# Altium footprint library IR Sensor.PCBLIB: 9 footprints
Each footprint in its own frame and in the unit in brackets; x right, y up, seen from the top. Pads: shape width x height; smd on the part's side, far side on the other; paste and mask are expansions set on the pad; w line width, h text height; cw(c..) or ccw(c..) is an arc to the next point about the centre after c.
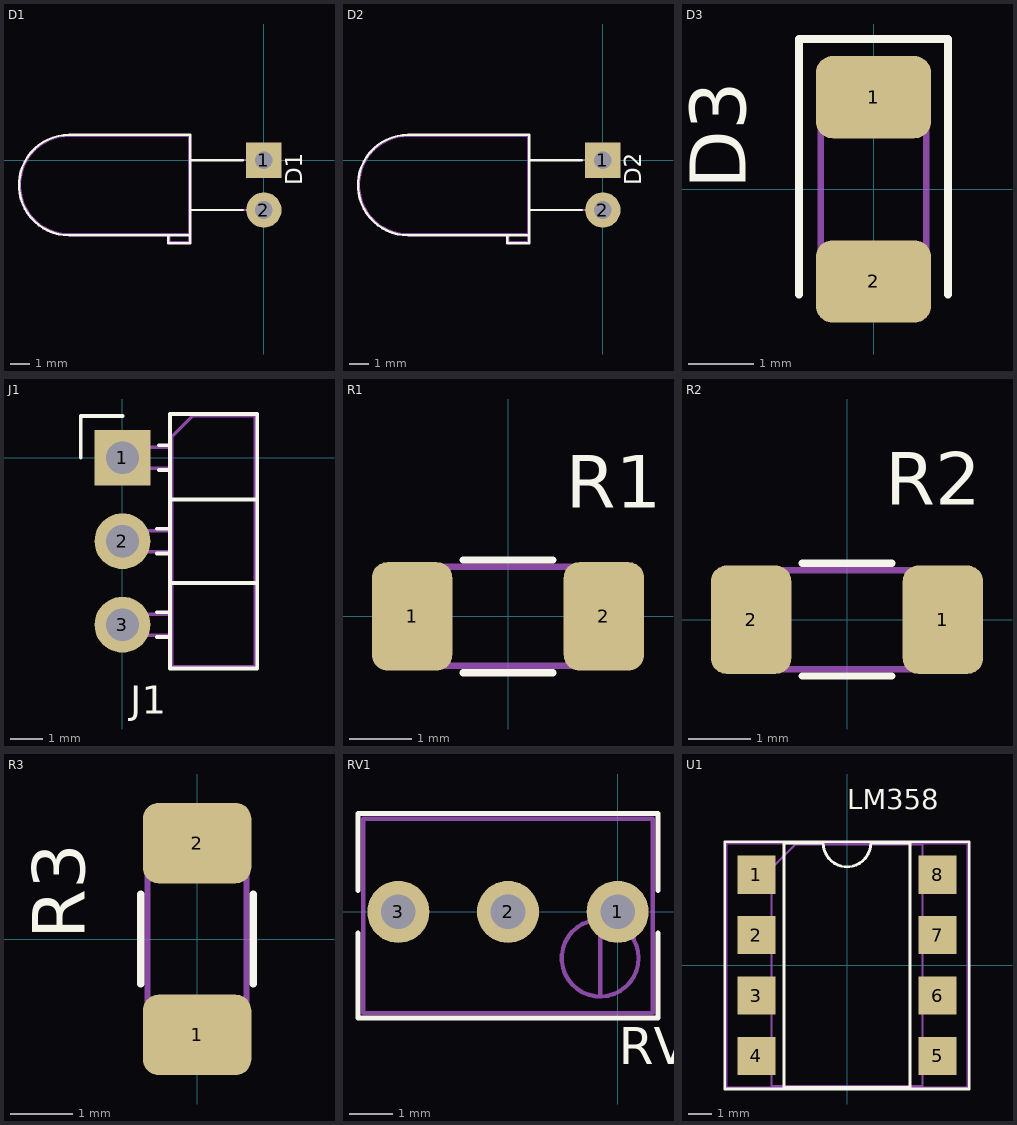
[diagram p0: the footprints below, top view; thin cyan lines are the x and y axes]

## D1 [mil]
pads (2):
  rect 70.87x70.87 / inner round 65.48 / far side rect 70.87x70.87 hole 35.43: 1(0,0)
  round 70.87 hole 35.43: 2(0,-100)
Top Overlay:
  lines w4.72: -147.64,-150.79 -191.73,-150.79 -191.73,-166.54 -147.64,-166.54 -147.64,-150.79 ; -147.64,-150.79 -147.64,50.79 -390.16,50.79 ccw(c-390.16,-50) -390.16,-150.79 -147.64,-150.79 ; -147.64,-100 -147.64,-100 ; -147.64,-100 -42.52,-100 ; -147.64,-100 -42.52,-100 ; -147.64,0 -147.64,0 ; -147.64,0 -42.52,0 ; -147.64,0 -42.52,0 ; -42.52,-100 -42.52,-100 ; -42.52,0 -42.52,0
  text "D1" at 77.17,-50 h33.46
tDocu:
  lines w3.94: -150,-148.43 -189.37,-148.43 -189.37,-164.17 -150,-164.17 -150,-148.43 ; -150,-148.43 -150,48.43 -390.16,48.43 ccw(c-390.16,-50) -390.16,-148.43 -150,-148.43 ; -150,-100 -150,-100 ; -150,-100 0,-100 ; -150,-100 0,-100 ; -150,0 -150,0 ; -150,0 0,0 ; -150,0 0,0 ; 0,-100 0,-100 ; 0,0 0,0
3D body "LED_D5.0mm_Horizontal_O3.81mm_Z3.0mm.step": height 232.28, standoff -78.74, extent -488.58,-164.17 11.81,48.43

## D2 [mil]
pads (2):
  rect 70.87x70.87 / inner round 65.48 / far side rect 70.87x70.87 hole 35.43: 1(0,0)
  round 70.87 hole 35.43: 2(0,-100)
Top Overlay:
  lines w4.72: -147.64,-150.79 -191.73,-150.79 -191.73,-166.54 -147.64,-166.54 -147.64,-150.79 ; -147.64,-150.79 -147.64,50.79 -390.16,50.79 ccw(c-390.16,-50) -390.16,-150.79 -147.64,-150.79 ; -147.64,-100 -147.64,-100 ; -147.64,-100 -42.52,-100 ; -147.64,-100 -42.52,-100 ; -147.64,0 -147.64,0 ; -147.64,0 -42.52,0 ; -147.64,0 -42.52,0 ; -42.52,-100 -42.52,-100 ; -42.52,0 -42.52,0
  text "D2" at 77.17,-50 h33.46
tDocu:
  lines w3.94: -150,-148.43 -189.37,-148.43 -189.37,-164.17 -150,-164.17 -150,-148.43 ; -150,-148.43 -150,48.43 -390.16,48.43 ccw(c-390.16,-50) -390.16,-148.43 -150,-148.43 ; -150,-100 -150,-100 ; -150,-100 0,-100 ; -150,-100 0,-100 ; -150,0 -150,0 ; -150,0 0,0 ; -150,0 0,0 ; 0,-100 0,-100 ; 0,0 0,0
3D body "LED_D5.0mm_Horizontal_O3.81mm_Z3.0mm.step": height 232.28, standoff -78.74, extent -488.58,-164.17 11.81,48.43

## D3 [mil]
pads (2):
  rrect40% 68.9x49.21 smd: 1(0,55.12) 2(0,-55.12)
Top Overlay:
  lines w4.72: -44.69,-62.99 -44.69,89.96 44.69,89.96 44.69,-62.99
  text "D3" at -76.42,0 h33.46
tDocu:
  lines w3.94: -31.5,-62.99 -31.5,62.99 15.75,62.99 31.5,47.24 31.5,-62.99 -31.5,-62.99
3D body "LED_1206_3216Metric.step": height 43.31, standoff 0, extent -31.5,-62.99 31.5,62.99

## J1 [mm]
pads (3):
  rect 1.7x1.7 / inner round 1.571 / far side rect 1.7x1.7 hole 1: 1(0,0)
  round 1.7 hole 1: 2(0,-2.54) 3(0,-5.08)
Top Overlay:
  lines w0.12: -1.27,0 -1.27,1.27 0,1.27 ; 1.043,-5.46 1.44,-5.46 ; 1.043,-4.7 1.44,-4.7 ; 1.043,-2.92 1.44,-2.92 ; 1.043,-2.16 1.44,-2.16 ; 1.11,-0.38 1.44,-0.38 ; 1.11,0.38 1.44,0.38 ; 1.44,-3.81 4.1,-3.81 ; 1.44,-1.27 4.1,-1.27 ; 1.44,-6.41 1.44,1.33 4.1,1.33 4.1,-6.41 1.44,-6.41
  text "J1" at 0.24,-7.796 h0.85
tDocu:
  lines w0.1: 1.5,-5.4 -0.32,-5.4 -0.32,-4.76 1.5,-4.76 ; 1.5,-2.86 -0.32,-2.86 -0.32,-2.22 1.5,-2.22 ; 1.5,-0.32 -0.32,-0.32 -0.32,0.32 1.5,0.32 ; 1.5,-6.35 1.5,0.635 2.135,1.27 4.04,1.27 4.04,-6.35 1.5,-6.35
3D body "PinHeader_1x03_P2.54mm_Horizontal.step": height 2.54, standoff -3, extent -0.32,-6.35 10.04,1.27

## R1 [mil]
pads (2):
  rrect38% 51.18x68.9 smd: 1(-61.02,0) 2(61.02,0)
Top Overlay:
  lines w4.72: -28.62,-35.83 28.62,-35.83 ; -28.62,35.83 28.62,35.83
  text "R1" at 36.83,68.92 h33.46
tDocu:
  lines w3.94: -62.99,-31.5 -62.99,31.5 62.99,31.5 62.99,-31.5 -62.99,-31.5
3D body "R_1206_3216Metric.step": height 21.65, standoff 0, extent -62.99,-31.5 62.99,31.5

## R2 [mil]
pads (2):
  rrect38% 51.18x68.9 smd: 1(61.02,0) 2(-61.02,0)
Top Overlay:
  lines w4.72: -28.62,-35.83 28.62,-35.83 ; -28.62,35.83 28.62,35.83
  text "R2" at 24.36,73.32 h33.46
tDocu:
  lines w3.94: -62.99,-31.5 -62.99,31.5 62.99,31.5 62.99,-31.5 -62.99,-31.5
3D body "R_1206_3216Metric.step": height 21.65, standoff 0, extent -62.99,-31.5 62.99,31.5

## R3 [mil]
pads (2):
  rrect38% 68.9x51.18 smd: 1(0,-61.02) 2(0,61.02)
Top Overlay:
  lines w4.72: -35.83,-28.62 -35.83,28.62 ; 35.83,-28.62 35.83,28.62
  text "R3" at -71.65,0 h33.46
tDocu:
  lines w3.94: -31.5,-62.99 -31.5,62.99 31.5,62.99 31.5,-62.99 -31.5,-62.99
3D body "R_1206_3216Metric.step": height 21.65, standoff 0, extent -31.5,-62.99 31.5,62.99

## RV1 [mil]
pads (3):
  round 56.69 hole 31.5: 1(0,0) 2(-100,0) 3(-200,0)
Top Overlay:
  lines w4.72: -236.81,-19.53 -236.81,-96.85 36.81,-96.85 36.81,-19.53 ; -236.81,19.45 -236.81,89.76 36.81,89.76 36.81,19.45
  text "RV1" at 0.91,-139.15 h33.46
tDocu:
  circle w3.94: c-15.94,-42.13 r35.04
  lines w3.94: -232.09,-92.13 -232.09,85.04 32.09,85.04 32.09,-92.13 -232.09,-92.13 ; -15.94,-76.85 -15.91,-7.44 -15.94,-76.85
3D body "Potentiometer_Bourns_3266Y_Vertical.step": height 325.2, standoff -192.13, extent -232.09,-88.58 32.09,88.58

## U1 [mil]
pads (8):
  rect 62.99x62.99 smd: 1(-150,150) 2(-150,50) 3(-150,-50) 4(-150,-150) 5(150,-150) 6(150,-50) 7(150,50) 8(150,150)
Top Overlay:
  lines w4.72: -202.36,-204.72 -202.36,204.72 202.36,204.72 202.36,-204.72 -202.36,-204.72 ; -104.33,-202.36 -104.33,202.36 -39.37,202.36 ccw(c0,202.36) 39.37,202.36 104.33,202.36 104.33,-202.36 -104.33,-202.36
  text "LM358" at 0,258.48 h33.46
tDocu:
  lines w3.94: -200,-202.36 -200,202.36 200,202.36 200,-202.36 -200,-202.36 ; -125,-200 -125,160.63 -85.63,200 125,200 125,-200 -125,-200
3D body "DIP-8_W7.62mm_SMDSocket.step": height 144.88, standoff 0, extent -176.22,-202.36 176.22,202.36